# Altium schematic symbol library Relay%.SchLib: 38 symbols
Pins are listed as number, name and electrical type; pins without a type are passive.

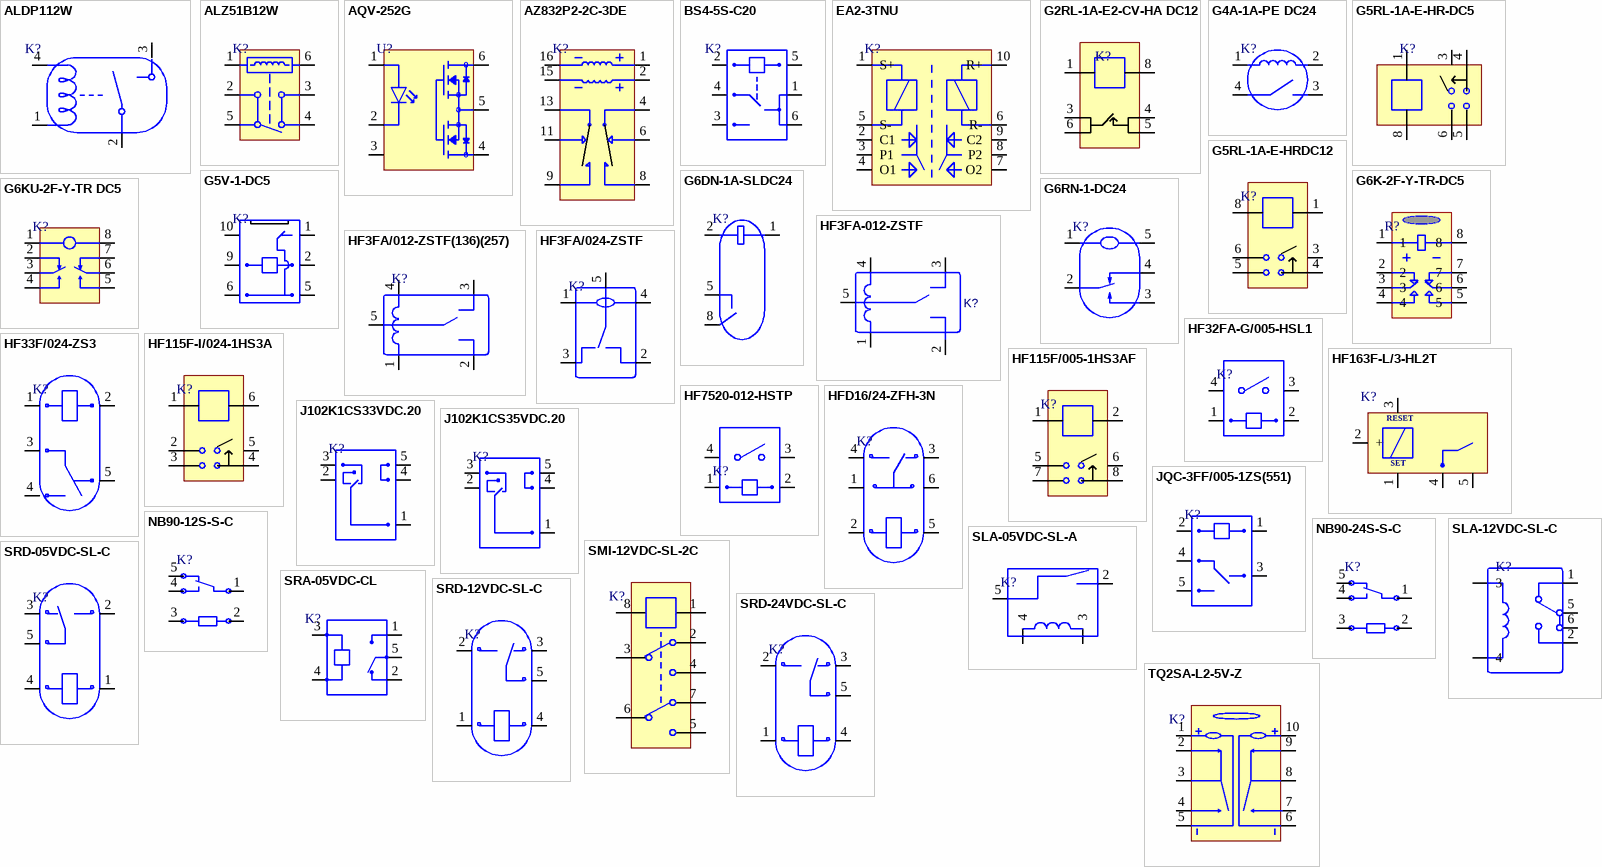
[diagram p0: symbols ALDP112W to TQ2SA-L2-5V-Z]

## ALDP112W
designator K?
RELAY GEN PURPOSE SPST 5A 12V; Manufacturer: Panasonic; Manufacturer Part Number: ALDP112W; Item Type: Power Relays; Supplier: Mouser; Supplier Part Number: 769-ALDP112W; RoHS: Yes; Stock: 2330; Pricing: 1=0.99, 10=0.985, 50=0.985, 100=0.985, 1000=0.985, 10000=0.985 (USD); ComponentLink1URL: https://datasheet.ciiva.com/18711/ds-61b10-en-ldp-18711609.pdf?src-supplier=Distrelec; ComponentLink1Description: https://datasheet.ciiva.com/18711/ds-61b10-en-ldp-18711609.pdf?src-supplier=Distrelec; LCSC Part Number: C115718
footprint ALDP112W
pins: 1, 2, 3, 4

## ALZ51B12W
designator K?
RELAY GEN PURPOSE SPST 16A 12V; Manufacturer: Panasonic; Manufacturer Part Number: ALZ51B12W; Item Type: Power Relays; Supplier: Mouser; LCSC Part Number: C6120224; RoHS: Yes; Stock: 24; Pricing: 1=3.35, 10=2.79, 50=2.65, 100=2.4, 1000=1.72, 10000=1.72 (USD); ComponentLink1URL: https://datasheet.ciiva.com/24416/mech-eng-lz-24416941.pdf?src-supplier=Onlinecomponents.com; ComponentLink1Description: https://datasheet.ciiva.com/24416/mech-eng-lz-24416941.pdf?src-supplier=Onlinecomponents.com
footprint ALZ51B12W
pins: 1, 2, 3, 4, 5, 6

## AQV-252G
designator U?
SSR RELAY SPST-NO 2.5A 0-60V; Manufacturer: Panasonic; Manufacturer Part Number: AQV-252G; Item Type: Solid State Relays; Max Supply Voltage: 1.5V; Max Output Voltage: 60V; Max Input Current: 50mA; Isolation Voltage: 1.5kV; Throw Configuration: SPST; Forward Current: 500uA; Input Type: DC; On-State Resistance: 80mR; Rise Time: 1.1ms; On-state Resistance-Max: 120mR; Turn-On Delay Time: 5ms; Test Voltage: 2.5kV; Power Dissipation: 550mW; Value: 0.8pF; Approvals: UL,VDE; Supplier: Mouser; Supplier Part Number: 769-AQV252G; RoHS: Yes; Stock: 4354; Pricing: 1=4.87, 10=3.86, 50=3.86, 100=3.66, 1000=3.04, 10000=3.04 (USD); Case/Package: DIP; Pins: 6; Min Operating Temperature: -40°C; Max Operating Temperature: 85°C; Max Output current: 2.5A; Packaging: Rail/Tube; Package Quantity: 50; Output Current: 2.5A; Termination: PC Pin; Load Current: 2.5A; Input Current: 50mA; Series: PhotoMOS™ AQV; Output Voltage: 60V; Isolation Voltage-Max: 1.5kV; Current Rating: 2.5A; Voltage Rating (AC): 60V; Contact Resistance: 80mR; Contact Type: 1 maker; Length: 8.8mm; Width: 6.4mm; Height: 3.9mm; Depth: 6.4mm; Radiation Hardening: No; Reach SVHC Compliant: No; RoHS Compliant: Yes; Lead Free: Lead Free; ComponentLink1URL: https://datasheet.ciiva.com/14667/0900766b80e30c04-14667104.pdf?src-supplier=Rs; ComponentLink1Description: https://datasheet.ciiva.com/14667/0900766b80e30c04-14667104.pdf?src-supplier=Rs; ComponentLink2URL: https://datasheet.ciiva.com/19470/991220-19470769.pdf?src-supplier=Jameco; ComponentLink2Description: https://datasheet.ciiva.com/19470/991220-19470769.pdf?src-supplier=Jameco; ComponentLink3URL: https://datasheet.ciiva.com/26327/504861-da-01-en-photomos-relais-1a-2500ma-60v-aqv252g-26327386.pdf?src-supplier=Conrad; ComponentLink3Description: https://datasheet.ciiva.com/26327/504861-da-01-en-photomos-relais-1a-2500ma-60v-aqv252g-26327386.pdf?src-supplier=Conrad; ComponentLink4URL: https://datasheet.ciiva.com/1190/1794196-1190567.pdf?src-supplier=Newark; ComponentLink4Description: https://datasheet.ciiva.com/1190/1794196-1190567.pdf?src-supplier=Newark; ComponentLink5URL: https://datasheet.ciiva.com/48435/cfaqv252g-data-e-48435733.pdf?src-supplier=Distrelec; ComponentLink5Description: https://datasheet.ciiva.com/48435/cfaqv252g-data-e-48435733.pdf?src-supplier=Distrelec; ComponentLink6URL: https://datasheet.ciiva.com/1526/1848833-1526253.pdf?src-supplier=Element14; ComponentLink6Description: https://datasheet.ciiva.com/1526/1848833-1526253.pdf?src-supplier=Element14; ComponentLink7URL: https://datasheet.ciiva.com/2421/photomosdimensions2-2421589.pdf?src-supplier=Digikey; ComponentLink7Description: https://datasheet.ciiva.com/2421/photomosdimensions2-2421589.pdf?src-supplier=Digikey; ComponentLink8URL: https://datasheet.ciiva.com/18421/70158328-18421196.pdf?src-supplier=Allied+Electronics; ComponentLink8Description: https://datasheet.ciiva.com/18421/70158328-18421196.pdf?src-supplier=Allied+Electronics
footprint 6-DIP
pins: 1, 2, 3, 4, 5, 6

## AZ832P2-2C-3DE
designator K?
Magnetic Latching Relays ROHS; Manufacturer: ZETTLER; Manufacturer Part Number: AZ832P2-2C-3DE; Item Type: Relay; Package: Custom; LCSC Part Number: C20262850; ComponentLink1Description: LCSC; ComponentLink1URL: https://www.lcsc.com/product-detail/Magnetic-Latching-Relays_ZETTLER-AZ832P2-2C-3DE_C20262850.html?s_z=n_AZ832P2-2C-3DE
footprint AZ832P2-2C-3DE
pins: 1, 2, 4, 6, 8, 9, 11, 13, 15, 16

## BS4-5S-C20
designator K?
5V SPDT (1 Form C) 6 DIP,11x15.5mm Power Relays ROHS; Manufacturer: NBC; Manufacturer Part Number: BS4-5S-C20; Item Type: Relay; Package: DIP,11x15.5mm; LCSC Part Number: C396938; ComponentLink1Description: LCSC; ComponentLink1URL: https://www.lcsc.com/product-detail/Power-Relays_NBC-BS4-5S-C20_C396938.html
footprint BS4-5S-C20
pins: 1, 2, 3, 4, 5, 6

## EA2-3TNU
designator K?
Relay Gen Purpose DPDT 1A 3VDC; Manufacturer: KEMET; Manufacturer Part Number: EA2-3TNU; Coil Current: 46.7mA; Coil Type: Latching, Dual Coil; Coil Voltage (DC): 3V; Coil Resistance: 64.3R; Relay Type: General Purpose; Operate Time: 2ms; Release Time: 1ms; Coil Power: 140mW; Supplier 1: Mouser; RoHS: No; Category: Uncategorized; Stock 1: 873; Pricing 1: 1=3.85000, 10=3.11000, 50=3.11000, 100=2.42000, 250=2.00000, 500=1.85000, 1000=1.85000, 3600=1.58000, 10000=1.58000 (USD); Mount: Through Hole; Contact Material: Gold,Silver; Min Operating Temperature: -40°C; Max Operating Temperature: 85°C; Throw Configuration: DPDT; Package Quantity: 3600; Termination: PC Pin; Packaging: Rail/Tube; Contact Current Rating: 1A; RoHS Compliant: No; ComponentLink1URL: https://api.kemet.com/component-edge/download/datasheet/EA2-3TNU.pdf?src-supplier=Digi-Key; ComponentLink1Description: https://api.kemet.com/component-edge/download/datasheet/EA2-3TNU.pdf?src-supplier=Digi-Key; Supplier Part Number 1: 80-EA2-3TNU; LCSC Part Number: C1560650; Item Type: Relay
footprint EA2-3TNU
pins: 1 S+, 2 C1, 3 P1, 4 O1, 5 S-, 6 R-, 7 O2, 8 P2, 9 C2, 10 R+

## G2RL-1A-E2-CV-HA DC12
designator K?
RELAY GEN PURPOSE SPST 23A 12V; Coil Resistance: 360R; Contact Resistance: 100mR; Item Type: RELAY; ComponentLink1Description: LCSC; Supplier: Digi-Key; Supplier Part Number: Z13015-ND; RoHS: No; Category: Power Relays; Stock: 2658; Pricing: 1=4.97, 10=4.657, 25=4.14, 40=3.933, 80=3.726, 230=3.312, 500=3.105, 1000=2.89799 (USD); ComponentLink2URL: https://media.digikey.com/pdf/Data%20Sheets/Omron%20PDFs/G2RL-1A-E2-CV-HA%20DC5.pdf?src-supplier=Digi-Key; ComponentLink2Description: https://media.digikey.com/pdf/Data%20Sheets/Omron%20PDFs/G2RL-1A-E2-CV-HA%20DC5.pdf?src-supplier=Digi-Key; ComponentLink3URL: https://datasheet.octopart.com/G2RL-1A-E2-CV-HA-DC12-Omron-datasheet-27910337.pdf?src-supplier=TME; ComponentLink3Description: https://datasheet.octopart.com/G2RL-1A-E2-CV-HA-DC12-Omron-datasheet-27910337.pdf?src-supplier=TME
footprint G2RL-1A-E2-CV-HA DC12
pins: 1, 3, 4, 5, 6, 8

## G4A-1A-PE DC24
designator K?
RELAY GEN PURPOSE SPST 20A 24V; Manufacturer: Omron; Manufacturer Part Number: G4A-1A-PE DC24; Supplier: Arrow Electronics; LCSC Part Number: C231366; RoHS: Yes; Item Type: Relay; Stock: 435; Pricing: 20=4.964, 50=4.555, 100=4.412 (USD); ComponentLink1URL: https://omronfs.omron.com/en_US/ecb/products/pdf/en-g4a.pdf?src-supplier=Digikey; ComponentLink1Description: https://omronfs.omron.com/en_US/ecb/products/pdf/en-g4a.pdf?src-supplier=Digikey; ComponentLink2URL: https://datasheet.octopart.com/G4A-1A-PE-DC24-Omron-datasheet-8474777.pdf?src-supplier=Newark; ComponentLink2Description: https://datasheet.octopart.com/G4A-1A-PE-DC24-Omron-datasheet-8474777.pdf?src-supplier=Newark; ComponentLink3URL: https://datasheet.octopart.com/G4A-1A-PE-DC24-Omron-datasheet-151868987.pdf?src-supplier=Master+Electronics; ComponentLink3Description: https://datasheet.octopart.com/G4A-1A-PE-DC24-Omron-datasheet-151868987.pdf?src-supplier=Master+Electronics
footprint G4A-1A-PE DC24
pins: 1, 2, 3, 4

## G5RL-1A-E-HR-DC5
designator K?
RELAY GEN PURPOSE SPST 16A 5V; Manufacturer: Omron; Manufacturer Part Number: G5RL-1A-E-HR-DC5; Item Type: Power Relays; Power Rating: 400mW; Max Voltage Rating (AC): 250V; Max Voltage Rating (DC): 24V; Operate Time: 15ms; Coil Current: 80mA; Coil Resistance: 62.5R; Supplier: Digikey; LCSC Part Number: C113250; RoHS: Yes; Stock: 529; Pricing: 1=4.95, 10=4.327, 25=4.1008, 50=3.9372, 100=3.7801, 300=3.54387, 500=3.43916, 1000=3.30195 (USD); Mounting Technology: Through Hole; Case/Package: DIP; Pins: 6; Contact Material: Silver,Cadmium; Weight: 10g; Min Operating Temperature: -40°C; Max Operating Temperature: 85°C; Contact Current Rating: 16A; Max Current Rating: 16A; Throw Configuration: SPST; Termination: PC Pin; Power Consumption: 400mW; Coil Voltage (DC): 5V; Width: 12.7mm; Height: 15.7mm; Lead Free: Lead Free; ComponentLink1URL: https://datasheet.ciiva.com/5233/g5rl-0911-9106-5233888.pdf?src-supplier=Mouser; ComponentLink1Description: https://datasheet.ciiva.com/5233/g5rl-0911-9106-5233888.pdf?src-supplier=Mouser
footprint G5RL-1A-E-HR-DC5
pins: 1, 3, 4, 5, 6, 8

## G5RL-1A-E-HRDC12
designator K?
RELAY GEN PURPOSE SPST 16A 12V; Manufacturer: Omron; Manufacturer Part Number: G5RL-1A-E-HRDC12; Supplier: Rs; Supplier Part Number: 6839227; RoHS: Yes; Category: Power Relays; Stock: 213; Pricing: 1=4.64, 25=3.67, 50=3.47, 100=3.31, 250=2.96 (GBP); ComponentLink1URL: https://omronfs.omron.com/en_US/ecb/products/pdf/en-g5rl.pdf?src-supplier=Digi-Key; ComponentLink1Description: https://omronfs.omron.com/en_US/ecb/products/pdf/en-g5rl.pdf?src-supplier=Digi-Key; ComponentLink2URL: http://datasheet.octopart.com/G5RL-1A-E-HR-DC12-Omron-datasheet-10910182.pdf?src-supplier=Mouser; ComponentLink2Description: http://datasheet.octopart.com/G5RL-1A-E-HR-DC12-Omron-datasheet-10910182.pdf?src-supplier=Mouser; ComponentLink3URL: http://datasheet.octopart.com/G5RL-1A-E-HR-DC12-Omron-datasheet-10910182.pdf?src-supplier=Farnell; ComponentLink3Description: http://datasheet.octopart.com/G5RL-1A-E-HR-DC12-Omron-datasheet-10910182.pdf?src-supplier=Farnell; ComponentLink4URL: http://datasheet.octopart.com/G5RL-1A-E-HR-DC12-Omron-datasheet-10910182.pdf?src-supplier=Avnet; ComponentLink4Description: http://datasheet.octopart.com/G5RL-1A-E-HR-DC12-Omron-datasheet-10910182.pdf?src-supplier=Avnet; ComponentLink5URL: http://datasheet.octopart.com/G5RL-1A-E-HR-DC12-Omron-datasheet-10910182.pdf?src-supplier=Digi-Key; ComponentLink5Description: http://datasheet.octopart.com/G5RL-1A-E-HR-DC12-Omron-datasheet-10910182.pdf?src-supplier=Digi-Key; ComponentLink6URL: http://datasheet.octopart.com/G5RL-1A-E-HR-DC12-Omron-datasheet-10910182.pdf?src-supplier=Arrow+Electronics; ComponentLink6Description: http://datasheet.octopart.com/G5RL-1A-E-HR-DC12-Omron-datasheet-10910182.pdf?src-supplier=Arrow+Electronics; ComponentLink7URL: http://datasheet.octopart.com/G5RL-1A-E-HR-DC12-Omron-datasheet-10910182.pdf?src-supplier=Onlinecomponents.com; ComponentLink7Description: http://datasheet.octopart.com/G5RL-1A-E-HR-DC12-Omron-datasheet-10910182.pdf?src-supplier=Onlinecomponents.com; ComponentLink8URL: http://datasheet.octopart.com/G5RL-1A-E-HR-DC12-Omron-datasheet-10910182.pdf?src-supplier=Newark; ComponentLink8Description: http://datasheet.octopart.com/G5RL-1A-E-HR-DC12-Omron-datasheet-10910182.pdf?src-supplier=Newark; ComponentLink9URL: https://datasheet.octopart.com/G5RL-1A-E-HR-DC12-Omron-datasheet-87796980.pdf?src-supplier=Master+Electronics; ComponentLink9Description: https://datasheet.octopart.com/G5RL-1A-E-HR-DC12-Omron-datasheet-87796980.pdf?src-supplier=Master+Electronics; ComponentLink10URL: http://datasheet.octopart.com/G5RL-1A-E-HR-DC12-Omron-datasheet-10910182.pdf?src-supplier=LCSC; ComponentLink10Description: http://datasheet.octopart.com/G5RL-1A-E-HR-DC12-Omron-datasheet-10910182.pdf?src-supplier=LCSC; ComponentLink11URL: http://datasheet.octopart.com/G5RL-1A-E-HR-DC12-Omron-datasheet-10910182.pdf?src-supplier=Today+Components; ComponentLink11Description: http://datasheet.octopart.com/G5RL-1A-E-HR-DC12-Omron-datasheet-10910182.pdf?src-supplier=Today+Components; LCSC Part Number: C231374; Item Type: Relay
footprint G5RL-1A-E-HRDC12
pins: 1, 3, 4, 5, 6, 8

## G5V-1-DC5
designator K?
RELAY GENERAL PURPOSE SPDT 1A 5V; Manufacturer: Omron; Manufacturer Part Number: G5V-1-DC5; Manufacturer Series: G5V-1; Coil Current: 30mA; Operate Time: 5ms; Coil Resistance: 167R; Coil Type: Non-Latching; Coil Power: 150mW; Voltage Rating (AC): 125V; Voltage Rating (DC): 60V; Number of Poles: 1; Life (Hours): 100000Hour; Relay Action: MOMENTARY; Approvals: UL,CSA; Reference Standard: UL; Supplier: Rs; Supplier Part Number: 369343P; RoHS: Yes; Category: Signal Relays; Stock: 1005; Pricing: 25=2.91, 100=2.88, 250=2.75, 500=2.55 (GBP); Mounting Technology: Through Hole,PCB; Case/Package: DIP; Pins: 6; Contact Material: Gold,Silver; Min Operating Temperature: -40°C; Max Operating Temperature: 70°C; Contact Current Rating: 1A; Throw Configuration: SPDT; Termination: PC Pin; Coil Voltage (DC): 5V; Series: G5V-1; Packaging: Bulk; Package Quantity: 25; Release Time: 5ms; Relay Type: General Purpose; Power Consumption: 150mW; Current Rating: 1A; Max Voltage Rating (AC): 125V; Max Current Rating: 1A; Max Voltage Rating (DC): 60V; Type: Electromechanical; Relay Function: SPDT; Switching Current: 1A; Length: 12.5mm; Width: 7.5mm; Height: 10mm; Depth: 7.5mm; Radiation Hardening: No; RoHS Compliant: Yes; Reach SVHC Compliant: Unknown; ComponentLink1URL: https://datasheet.ciiva.com/30083/en-g5v-1-30083503.pdf?src-supplier=Onlinecomponents.com; ComponentLink1Description: https://datasheet.ciiva.com/30083/en-g5v-1-30083503.pdf?src-supplier=Onlinecomponents.com; JLCPCB Part Number: C28695; Item Type: Relay
footprint G5V-1-DC5
pins: 1, 2, 5, 6, 9, 10

## G6DN-1A-SLDC24
designator K?
RELAY GEN PURPOSE SPST 5A 24V; Manufacturer: Omron; Manufacturer Part Number: G6DN-1A-SLDC24; Item Type: Power Relays; Supplier: Digikey; LCSC Part Number: C397209; RoHS: No; Stock: 457; Pricing: 1=2.37, 10=2.078, 25=2.068, 40=1.8325, 100=1.519, 300=1.47, 500=1.41912 (USD); ComponentLink1URL: http://datasheet.octopart.com/G6DN-1A-SL-DC24-Omron-datasheet-138102761.pdf?src-supplier=Rs; ComponentLink1Description: http://datasheet.octopart.com/G6DN-1A-SL-DC24-Omron-datasheet-138102761.pdf?src-supplier=Rs; ComponentLink2URL: http://datasheet.octopart.com/G6DN-1A-SL-DC24-Omron-datasheet-138102761.pdf?src-supplier=Newark; ComponentLink2Description: http://datasheet.octopart.com/G6DN-1A-SL-DC24-Omron-datasheet-138102761.pdf?src-supplier=Newark; ComponentLink3URL: http://datasheet.octopart.com/G6DN-1A-SL-DC24-Omron-datasheet-138102761.pdf?src-supplier=Mouser; ComponentLink3Description: http://datasheet.octopart.com/G6DN-1A-SL-DC24-Omron-datasheet-138102761.pdf?src-supplier=Mouser; ComponentLink4URL: http://datasheet.octopart.com/G6DN-1A-SL-DC24-Omron-datasheet-138102761.pdf?src-supplier=Allied+Electronics; ComponentLink4Description: http://datasheet.octopart.com/G6DN-1A-SL-DC24-Omron-datasheet-138102761.pdf?src-supplier=Allied+Electronics; ComponentLink5URL: http://datasheet.octopart.com/G6DN-1A-SL-DC24-Omron-datasheet-138102761.pdf?src-supplier=Farnell; ComponentLink5Description: http://datasheet.octopart.com/G6DN-1A-SL-DC24-Omron-datasheet-138102761.pdf?src-supplier=Farnell; ComponentLink6URL: http://datasheet.octopart.com/G6DN-1A-SL-DC24-Omron-datasheet-138102761.pdf?src-supplier=Digikey; ComponentLink6Description: http://datasheet.octopart.com/G6DN-1A-SL-DC24-Omron-datasheet-138102761.pdf?src-supplier=Digikey; ComponentLink7URL: http://datasheet.octopart.com/G6DN-1A-SL-DC24-Omron-datasheet-138102761.pdf?src-supplier=Sager+Electronics; ComponentLink7Description: http://datasheet.octopart.com/G6DN-1A-SL-DC24-Omron-datasheet-138102761.pdf?src-supplier=Sager+Electronics
footprint G6DN-1A-SL DC24
pins: 1, 2, 5, 8

## G6K-2F-Y-TR-DC5
designator R?
RELAY TELECOM DPDT 1A 5V; Manufacturer: Omron; Manufacturer Part Number: G6K-2F-Y-TR-DC5; Supplier: Digikey; Supplier Part Number: Z128CT-ND; RoHS: Yes; Category: Signal Relays; Stock: 17486; Pricing: 1=4.49, 10=4.211, 25=3.7428, 50=3.5558, 100=3.3686, 250=2.99428 (USD); ComponentLink1URL: https://datasheet.ciiva.com/2416/en-g6k-2416490.pdf?src-supplier=Digikey; ComponentLink1Description: https://datasheet.ciiva.com/2416/en-g6k-2416490.pdf?src-supplier=Digikey; ComponentLink2URL: https://datasheet.ciiva.com/30094/81en-g6k-30094551.pdf?src-supplier=Onlinecomponents.com; ComponentLink2Description: https://datasheet.ciiva.com/30094/81en-g6k-30094551.pdf?src-supplier=Onlinecomponents.com; LCSC Part Number: C47190; Item Type: Relay
footprint G6K-2F-Y-TR DC5
pins: 1, 2, 3, 4, 5, 6, 7, 8

## G6KU-2F-Y-TR DC5
designator K?
RELAY TELECOM DPDT 1A 5V; Manufacturer: Omron; Manufacturer Part Number: G6KU-2F-Y-TR DC5; Item Type: Signal Relays; Coil Current: 21mA; Coil Power: 100mW; Coil Resistance: 237Ω; Coil Type: Latching, Single Coil; Coil Voltage (DC): 3.75V; Contact Current Rating: 300mA; Contact Resistance: 100mΩ; Contact Voltage Rating (AC): 125V; Electrical Life: 100kcycles; Insulation Resistance: 1GΩ; Max Voltage Rating (DC): 30V; Operate Time: 3ms; Sealable: SEALED TYPE; Supplier: DigiKey; LCSC Part Number: C2153173; RoHS: Compliant; Stock: 15009; Pricing: 1=4.5, 10=4.011, 25=3.8308, 50=3.6998, 100=3.5729, 250=3.41172 (USD); Contact Material: Silver; Height: 5.2mm; Length: 10mm; Lifecycle Status: Production; Max Current Rating: 1A; Max Operating Temperature: 70°C; Max Voltage Rating (AC): 125V; Min Operating Temperature: -40°C; Mounting Technology: Surface Mount; Pins: 8; Number of Terminals: 8; Packaging: Tape & Reel (TR); Power Consumption: 100mW; Radiation Hardening: No; REACH SVHC: Yes; Relay Type: Telecom; Release Time: 3ms; Response Time: 3ms; Termination: Gull Wing; Throw Configuration: DPDT; ComponentLink1URL: https://datasheet.octopart.com:443/G6KU-2F-Y-TRDC5-Omron-datasheet-180955985.pdf?src-supplier=IHS; ComponentLink1Description: https://datasheet.octopart.com:443/G6KU-2F-Y-TRDC5-Omron-datasheet-180955985.pdf?src-supplier=IHS; ComponentLink2URL: https://datasheet.octopart.com:443/G6KU-2F-Y-TR-DC5-Omron-datasheet-10910167.pdf?src-supplier=Omron; ComponentLink2Description: https://datasheet.octopart.com:443/G6KU-2F-Y-TR-DC5-Omron-datasheet-10910167.pdf?src-supplier=Omron; ComponentLink3URL: https://datasheet.octopart.com:443/G6KU-2F-Y-TR-DC5-Omron-datasheet-151868995.pdf?src-supplier=Master+Electronics; ComponentLink3Description: https://datasheet.octopart.com:443/G6KU-2F-Y-TR-DC5-Omron-datasheet-151868995.pdf?src-supplier=Master+Electronics; ComponentLink4URL: https://datasheet.octopart.com:443/G6KU-2F-Y-TR-DC5-Omron-datasheet-5395161.pdf?src-supplier=Sager+Electronics; ComponentLink4Description: https://datasheet.octopart.com:443/G6KU-2F-Y-TR-DC5-Omron-datasheet-5395161.pdf?src-supplier=Sager+Electronics
footprint G6KU-2F-Y-TR DC5
pins: 1, 2, 3, 4, 5, 6, 7, 8

## G6RN-1-DC24
designator K?
RELAY GEN PURPOSE SPDT 8A 24V; Manufacturer: Omron; Manufacturer Part Number: G6RN-1-DC24; Item Type: Relays; Supplier: Rs; LCSC Part Number: C397134; RoHS: Yes; Stock: 2257; ComponentLink1URL: https://datasheet.ciiva.com/26921/getdatasheetpartid-770308-26921141.pdf?src-supplier=Verical; ComponentLink1Description: https://datasheet.ciiva.com/26921/getdatasheetpartid-770308-26921141.pdf?src-supplier=Verical; ComponentLink2URL: https://datasheet.ciiva.com/8000/1533700-8000602.pdf?src-supplier=Element14; ComponentLink2Description: https://datasheet.ciiva.com/8000/1533700-8000602.pdf?src-supplier=Element14; ComponentLink3URL: https://datasheet.ciiva.com/30072/en-g6rn-30072442.pdf?src-supplier=Onlinecomponents.com; ComponentLink3Description: https://datasheet.ciiva.com/30072/en-g6rn-30072442.pdf?src-supplier=Onlinecomponents.com; ComponentLink4URL: https://datasheet.ciiva.com/5232/g6rn-0911-5232733.pdf?src-supplier=Mouser; ComponentLink4Description: https://datasheet.ciiva.com/5232/g6rn-0911-5232733.pdf?src-supplier=Mouser
footprint G6RN-1 DC24
pins: 1, 2, 3, 4, 5

## HF3FA-012-ZSTF
designator K?
12V SPDT (1 Form C) Plugin,15.2x19mm Power Relays ROHS; Manufacturer: HF(宏发); Manufacturer Part: HF3FA-012-ZSTF; Item Type: Relay; Supplier: LCSC; LCSC Part Number: C190455
footprint HF3FA-012-ZSTF
pins: 1, 2, 3, 4, 5

## HF3FA/012-ZSTF(136)(257)
designator K?
12V SPDT (1 Form C) Plugin,15.2x19mm Power Relays ROHS; Manufacturer: Hongfa; Manufacturer Part Number: HF3FA/012-ZSTF(136)(257); Item Type: Relay; Supplier: Future Electronics; Supplier Part Number: 8045258; RoHS: No; Stock: 25478; Pricing: 1=0.46, 75=0.445, 250=0.425, 750=0.41, 2500=0.38 (USD); LCSC Part Number: C190455
footprint HF3FA/012-ZSTF(136)(257)
pins: 1, 2, 3, 4, 5

## HF3FA/024-ZSTF
designator K?
24V SPDT (1 Form C) Plugin,15.2x19mm Power Relays ROHS; Manufacturer: HF(Xiamen Hongfa Electroacoustic); Manufacturer Part Number: HF3FA/024-ZSTF; Package: Plugin,15.2x19mm; LCSC Part Number: C194242; Item Type: Power Relay; ComponentLink1Description: LCSC; ComponentLink1URL: https://www.lcsc.com/product-detail/Power-Relays_HF-Xiamen-Hongfa-Electroacoustic-HF3FA-024-ZSTF_C194242.html
footprint HF3FA/024-ZSTF
pins: 1, 2, 3, 4, 5

## HF32FA-G/005-HSL1
designator K?
AgSnO2 5V 10A 10A@250VAC Normal Open:1A(SPST-Normal Open) 4 Plugin,10.1x17.6mm Power Relays ROHS; Manufacturer: HF; Manufacturer Part Number: HF32FA-G/005-HSL1; Item Type: Relay; Package: Plugin,10.1x17.6mm; LCSC Part Number: C91370; ComponentLink1Description: LCSC; ComponentLink1URL: https://www.lcsc.com/product-detail/Power-Relays_HF-Xiamen-Hongfa-Electroacoustic-HF32FA-G-005-HSL1_C91370.html
footprint HF32FA-G/005-HSL1
pins: 1, 2, 3, 4

## HF33F/024-ZS3
designator K?
24V 10A SPDT (1 Form C) Plugin,10.2x20.5mm Power Relays ROHS; Manufacturer: HF(Xiamen Hongfa Electroacoustic); Manufacturer Part Number: HF33F/024-ZS3; Item Type: Relay; Package: Plugin,10.2x20.5mm; LCSC Part Number: C36391; ComponentLink1Description: LCSC; ComponentLink1URL: https://www.lcsc.com/product-detail/Power-Relays_HF-Xiamen-Hongfa-Electroacoustic-HF33F-024-ZS3_C36391.html
footprint HF33F/024-ZS3
pins: 1, 2, 3, 4, 5

## HF115F-I/024-1HS3A
designator K?
24V AgSnO2 16A 16A@250VAC Normal Open:1A(SPST-Normal Open) 6 DIP,12.7x29mm Power Relays ROHS; Manufacturer: HF; Manufacturer Part Number: HF115F-I/024-1HS3A; Item Type: Relay; Package: DIP,12.7x29mm; LCSC Part Number: C194245; ComponentLink1Description: LCSC; ComponentLink1URL: https://www.lcsc.com/product-detail/Power-Relays_HF-Xiamen-Hongfa-Electroacoustic-HF115F-I-024-1HS3A_C194245.html
footprint HF115F-I/024-1HS3A
pins: 1, 2, 3, 4, 5, 6

## HF115F/005-1HS3AF
designator K?
AgSnO2 5V 16A 16A@250VAC Normal Open:1A(SPST-Normal Open) 6 DIP,12.7x29mm Power Relays ROHS; Manufacturer: HF; Manufacturer Part Number: HF115F/005-1HS3AF; Item Type: Relay; Package: DIP,12.7x29mm; LCSC Part Number: C882368; ComponentLink1Description: LCSC; ComponentLink1URL: https://www.lcsc.com/product-detail/Power-Relays_HF-Xiamen-Hongfa-Electroacoustic-HF115F-005-1HS3AF_C882368.html
footprint HF115F/005-1HS3AF
pins: 1, 2, 5, 6, 7, 8

## HF163F-L/3-HL2T
designator K?
AgSnO2 3V 5 Normal Open:1A(SPST-Normal Open) Plugin,10x24mm Magnetic Latching Relays ROHS; Manufacturer: HF(Xiamen Hongfa Electroacoustic); Manufacturer Part Number: HF163F-L/3-HL2T; Item Type: Relay; Package: Plugin,10x24mm; LCSC Part Number: C140724; ComponentLink1Description: LCSC; ComponentLink1URL: https://www.lcsc.com/product-detail/Magnetic-Latching-Relays_HF-Xiamen-Hongfa-Electroacoustic-HF163F-L-3-HL2T_C140724.html
footprint HF163F-L/3-HL2T
pins: 1 SET, 2 +, 3 RESET, 4 COM, 5 NO

## HF7520-012-HSTP
designator K?
12V AgSnO2 16A Normal Open:1A(SPST-Normal Open) 4 Plugin,16x22mm Power Relays ROHS; Manufacturer: HF; Manufacturer Part Number: HF7520-012-HSTP; Item Type: Relay; Package: Plugin,16x22mm; LCSC Part Number: C53788; ComponentLink1Description: LCSC; ComponentLink1URL: https://www.lcsc.com/product-detail/Power-Relays_HF-Xiamen-Hongfa-Electroacoustic-HF7520-012-HSTP_C53788.html
footprint HF7520-012-HSTP
pins: 1, 2, 3, 4

## HFD16/24-ZFH-3N
designator K?
24V 8A One Conversion: 1C (SPDT-Conversion) DIP,10.6x15.7mm Power Relays ROHS; Manufacturer: HF; Manufacturer Part Number: HFD16/24-ZFH-3N; Item Type: Relay; Package: DIP,10.6x15.7mm; LCSC Part Number: C399482; ComponentLink1Description: LCSC; ComponentLink1URL: https://www.lcsc.com/product-detail/Power-Relays_HF-Xiamen-Hongfa-Electroacoustic-HFD16-24-ZFH-3N_C399482.html
footprint HFD16/24-ZFH-3N
pins: 1, 2, 3, 4, 5, 6

## J102K1CS33VDC.20
designator K?
RELAY GEN PURPOSE SPDT 3A 3V; Manufacturer: CIT Relay & Switch; Manufacturer Part Number: J102K1CS33VDC.20; Supplier: Digi-Key; Supplier Part Number: 2449-J102K1CS33VDC.20-ND; RoHS: No; Category: Power Relays; Stock: 9880; Pricing: 1=1.6, 10=1.5, 25=1.3332, 50=1.2666, 100=1.1999, 250=1.06656, 500=0.9999, 1000=0.93324, 5000=0.89991 (USD); Item Type: Relay
footprint J102K1CS33VDC.20
pins: 1, 2, 3, 4, 5

## J102K1CS35VDC.20
designator K?
RELAY GEN PURPOSE SPDT 3A 5V; Manufacturer: CIT Relay & Switch; Manufacturer Part Number: J102K1CS35VDC.20; Supplier: Digi-Key; Supplier Part Number: 2449-J102K1CS35VDC.20-ND; RoHS: No; Category: Power Relays; Stock: 15659; Pricing: 1=0.97, 10=0.909, 25=0.808, 50=0.7676, 100=0.7272, 250=0.6464, 500=0.606, 1000=0.5656, 5000=0.5454 (USD)
footprint J102K1CS35VDC.20
pins: 1 Com, 2 NO, 3 NC, 4 K1, 5 K2

## JQC-3FF/005-1ZS(551)
designator K?
AgCdO 5V 10A SPDT (1 Form C) Electromagnetic Relay-Single Coil Plugin Power Relays ROHS; Manufacturer: HF(Xiamen Hongfa Electroacoustic); Manufacturer Part Number: JQC-3FF/005-1ZS(551); Item Type: Relay; Package: Plugin; LCSC Part Number: C9221; ComponentLink1Description: LCSC; ComponentLink1URL: https://www.lcsc.com/product-detail/Power-Relays_HF-Xiamen-Hongfa-Electroacoustic-JQC-3FF-005-1ZS-551_C9221.html
footprint JQC-3FF/005-1ZS(551)
pins: 1, 2, 3, 4, 5

## NB90-12S-S-C
designator K?
12V 40A One Conversion: 1C (SPDT-Conversion) Plugin,27.2x32mm Power Relays ROHS; Manufacturer: NBC; Manufacturer Part Number: NB90-12S-S-C; Supplier: LCSC; LCSC Part Number: C396903; RoHS: No; Item Type: Relays
footprint NB90-12S-S-C
pins: 1, 2, 3, 4, 5

## NB90-24S-S-C
designator K?
24V 40A One Conversion: 1C (SPDT-Conversion) Plugin,27.2x32mm Power Relays ROHS; Manufacturer: NBC; Manufacturer Part Number: NB90-24S-S-C; Item Type: Relay; Supplier: LCSC; LCSC Part Number: C396907; RoHS: No
footprint NB90-24S-S-C
pins: 1, 2, 3, 4, 5

## SLA-05VDC-SL-A
designator K?
250V@AC 5V 30A Normal Open:1A(SPST-Normal Open) Plugin,27.6x32mm Power Relays ROHS; Manufacturer: Ningbo Songle Relay; Manufacturer Part Number: SLA-05VDC-SL-A; Item Type: Relay; Package: Plugin,27.6x32mm; LCSC Part Number: C250645; ComponentLink1Description: LCSC; ComponentLink1URL: https://www.lcsc.com/product-detail/Power-Relays_Ningbo-Songle-Relay-SLA-05VDC-SL-A_C250645.html
footprint SLA-05VDC-SL-A
pins: 2, 3, 4, 5

## SLA-12VDC-SL-C
designator K?
250V@AC 12V 30A One Conversion: 1C (SPDT-Conversion) Plugin,27.6x32mm Power Relays ROHS; Manufacturer: Ningbo Forward Relay; Manufacturer Part Number: SLA-12VDC-SL-C; Item Type: Relay; Supplier: LCSC; LCSC Part Number: C125736; RoHS: No
footprint SLA-12VDC-SL-C
pins: 1, 2, 3, 4, 5, 6

## SMI-12VDC-SL-2C
designator K?
12V 5A DPDT (2 Form C) Electromagnetic Relay-Single Coil DIP-8 Power Relays ROHS; Manufacturer: Ningbo Songle Relay; Manufacturer Part Number: SMI-12VDC-SL-2C; Item Type: Relay; Package: DIP-8; LCSC Part Number: C40676; ComponentLink1Description: LCSC; ComponentLink1URL: https://www.lcsc.com/product-detail/Power-Relays_Ningbo-Songle-Relay-SMI-12VDC-SL-2C_C40676.html
footprint DIP-8
pins: 1, 2, 3, 4, 5, 6, 7, 8

## SRA-05VDC-CL
designator K?
5V 10A 20A@14VAC SPDT (1 Form C) 5 Plugin,12.4x16mm Power Relays ROHS; Manufacturer: Ningbo Songle Relay; Manufacturer Part Number: SRA-05VDC-CL; Item Type: Relay; Package: Plugin,12.4x16mm; LCSC Part Number: C99666; ComponentLink1Description: LCSC; ComponentLink1URL: https://www.lcsc.com/product-detail/Power-Relays_Ningbo-Songle-span-style-background-color-ff0-Relay-span-SRA-05VDC-CL_C99666.html
footprint SRA-05VDC-CL
pins: 1, 2, 3, 4, 5

## SRD-05VDC-SL-C
designator K?
250V@AC 5V 15A SPDT (1 Form C) Plugin,15.6x19.2mm Power Relays ROHS; Manufacturer: Ningbo Songle Relay; Manufacturer Part Number: SRD-05VDC-SL-C; Package: Plugin,15.6x19.2mm; LCSC Part Number: C35449; Item Type: Relays; ComponentLink1Description: LCSC; ComponentLink1URL: https://www.lcsc.com/product-detail/Power-Relays_Ningbo-Songle-Relay-SRD-05VDC-SL-C_C35449.html
footprint SRD-05VDC-SL-C
pins: 1, 2, 3, 4, 5

## SRD-12VDC-SL-C
designator K?
250V@AC 12V 15A SPDT (1 Form C) Plugin,15.6x19.2mm Power Relays ROHS; Manufacturer: Ningbo Forward Relay; Manufacturer Part Number: SRD-12VDC-SL-C; Supplier: LCSC; LCSC Part Number: C30431; RoHS: No; Category: Uncategorized
footprint SRD-12VDC-SL-C
pins: 1, 2, 3, 4, 5

## SRD-24VDC-SL-C
designator K?
250V@AC 24V 15A SPDT (1 Form C) Plugin,15.6x19.2mm Power Relays ROHS; Manufacturer: Ningbo Forward Relay; Manufacturer Part Number: SRD-24VDC-SL-C; Item Type: Relay; Supplier: LCSC; LCSC Part Number: C15840; RoHS: No
footprint SRD-24VDC-SL-C
pins: 1, 2, 3, 4, 5

## TQ2SA-L2-5V-Z
designator K?
RELAY TELECOM DPDT 500MA 5V; Manufacturer: Panasonic; Manufacturer Part Number: TQ2SA-L2-5V-Z; Description: TQ Relay (SMD SA type 2-coil latch T&R) | Panasonic Electronic Components TQ2SA-L2-5V-Z; Item Type: Signal Relays; Coil Current: 28mA; Coil Power: 140mW; Coil Resistance: 178Ω; Coil Type: Latching, Dual Coil; Coil Voltage (DC): 3.75V; Contact Current Rating: 2A; Contact Resistance: 75mΩ; Contact Voltage Rating (AC): 125V; Electrical Life: 100kcycles; Insertion Loss (dB): 0.8dB; Insulation Resistance: 1GΩ; Max Voltage Rating (DC): 220V; Number of Contacts: 2; Operate Time: 4ms; Supplier: Arrow Electronics; LCSC Part Number: C2684450; RoHS: Compliant; Stock: 95; Pricing: 37=2.711 (USD); Ambient Temperature Range High: 85°C; Contact Material: Silver; Contact Plating: Gold; Current Rating: 2A; Depth: 11.5mm; Height: 5.4mm; Lead Free: Lead Free; Length: 14mm; Lifecycle Status: Production; Max Current Rating: 2A; Max Operating Temperature: 70°C; Max Voltage Rating (AC): 125V; Min Operating Temperature: -40°C; Mounting Technology: Surface Mount; Pins: 10; Number of Terminals: 10; Packaging: Tape and Reel; Power Consumption: 140mW; Radiation Hardening: No; REACH SVHC: Yes; Relay Type: Telecom; Release Time: 4ms; Response Time: 4ms; Switching Current: 2A; Termination: Gull Wing; Throw Configuration: DPDT; Voltage Rating (AC): 125V; Voltage Rating (DC): 220V; Weight: 2g; Width: 9mm; ComponentLink1URL: https://datasheet.octopart.com:443/TQ2SA-L2-5V-Z-Panasonic-datasheet-138897391.pdf?src-supplier=Sager+Electronics; ComponentLink1Description: https://datasheet.octopart.com:443/TQ2SA-L2-5V-Z-Panasonic-datasheet-138897391.pdf?src-supplier=Sager+Electronics; ComponentLink2URL: https://datasheet.octopart.com:443/TQ2SA-L2-5V-Z-Panasonic-datasheet-34148902.pdf?src-supplier=IHS; ComponentLink2Description: https://datasheet.octopart.com:443/TQ2SA-L2-5V-Z-Panasonic-datasheet-34148902.pdf?src-supplier=IHS; ComponentLink3URL: https://datasheet.octopart.com:443/TQ2SA-L2-5V-Z-Panasonic-datasheet-110367.pdf?src-supplier=element14; ComponentLink3Description: https://datasheet.octopart.com:443/TQ2SA-L2-5V-Z-Panasonic-datasheet-110367.pdf?src-supplier=element14; ComponentLink4URL: https://datasheet.octopart.com:443/TQ2SA-L2-5V-Z-Panasonic-datasheet-8361856.pdf?src-supplier=Panasonic; ComponentLink4Description: https://datasheet.octopart.com:443/TQ2SA-L2-5V-Z-Panasonic-datasheet-8361856.pdf?src-supplier=Panasonic; ComponentLink5URL: https://datasheet.octopart.com:443/TQ2SA-L2-5V-Z-Panasonic-datasheet-11522959.pdf?src-supplier=Panasonic; ComponentLink5Description: https://datasheet.octopart.com:443/TQ2SA-L2-5V-Z-Panasonic-datasheet-11522959.pdf?src-supplier=Panasonic; ComponentLink6URL: https://datasheet.octopart.com:443/TQ2SA-L2-5V-Z-Panasonic-datasheet-136735749.pdf?src-supplier=Electro+Sonic; ComponentLink6Description: https://datasheet.octopart.com:443/TQ2SA-L2-5V-Z-Panasonic-datasheet-136735749.pdf?src-supplier=Electro+Sonic; ComponentLink7URL: https://datasheet.octopart.com:443/TQ2SA-L2-5V-Z-Panasonic-datasheet-27895613.pdf?src-supplier=Electro+Sonic; ComponentLink7Description: https://datasheet.octopart.com:443/TQ2SA-L2-5V-Z-Panasonic-datasheet-27895613.pdf?src-supplier=Electro+Sonic; ComponentLink8URL: https://datasheet.octopart.com:443/TQ2SA-L2-5V-Z-Panasonic-EW-datasheet-23711783.pdf?src-supplier=Electro+Sonic; ComponentLink8Description: https://datasheet.octopart.com:443/TQ2SA-L2-5V-Z-Panasonic-EW-datasheet-23711783.pdf?src-supplier=Electro+Sonic; ComponentLink9URL: https://datasheet.octopart.com:443/TQ2SA-L2-5V-Z-Panasonic-datasheet-152536022.pdf?src-supplier=Master+Electronics; ComponentLink9Description: https://datasheet.octopart.com:443/TQ2SA-L2-5V-Z-Panasonic-datasheet-152536022.pdf?src-supplier=Master+Electronics; ComponentLink10URL: https://datasheet.octopart.com:443/TQ2SA-L2-5V-Z-Panasonic-datasheet-30321.pdf?src-supplier=DigiKey; ComponentLink10Description: https://datasheet.octopart.com:443/TQ2SA-L2-5V-Z-Panasonic-datasheet-30321.pdf?src-supplier=DigiKey; ComponentLink11URL: https://datasheet.octopart.com:443/TQ2SA-L2-5V-Z-Panasonic-datasheet-10222392.pdf?src-supplier=Future+Electronics; ComponentLink11Description: https://datasheet.octopart.com:443/TQ2SA-L2-5V-Z-Panasonic-datasheet-10222392.pdf?src-supplier=Future+Electronics
footprint TQ2SA-L2-5V-Z
pins: 1, 2, 3, 4, 5, 6, 7, 8, 9, 10